# Altium footprint library Vibration_Datalogger.PcbLib: 76 footprints (part 3 of 5)
Each footprint in its own frame and in the unit in brackets; x right, y up, seen from the top. Pads: shape width x height; smd on the part's side, far side on the other; paste and mask are expansions set on the pad; w line width, h text height; cw(c..) or ccw(c..) is an arc to the next point about the centre after c.
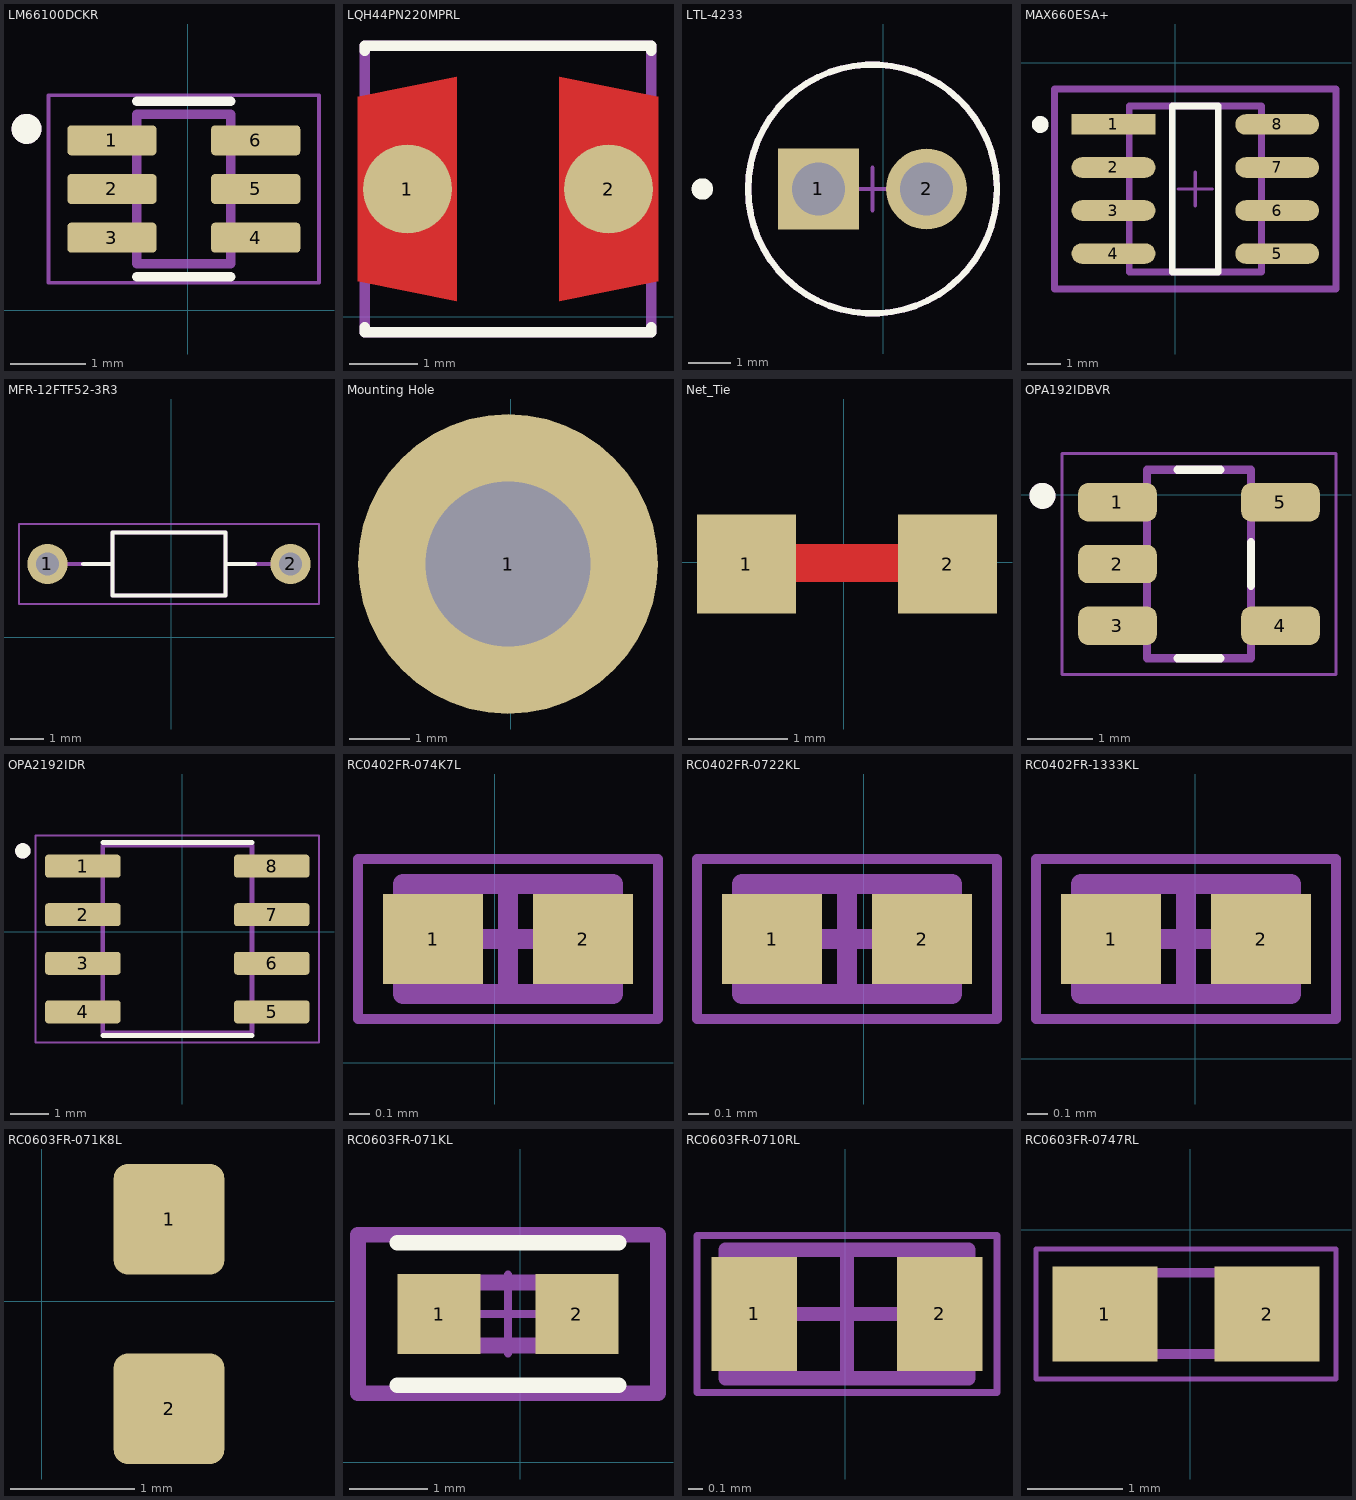
[diagram p2: the footprints below, top view; thin cyan lines are the x and y axes]

## LM66100DCKR [mm] "IC OR CTRLR IDEAL DIODE SC70-6"
pads (6):
  rrect25% 1.19x0.4 smd: 1(-1.01,2.27) 2(-1.01,1.62) 3(-1.01,0.97) 4(0.91,0.97) 5(0.91,1.62) 6(0.91,2.27)
Top Overlay:
  circle w0.2: c-2.15,2.422 r0.1
  lines w0.127: -0.675,0.45 0.575,0.45 ; -0.675,2.79 0.575,2.79
Mechanical 13:
  circle w0.2: c-2.15,2.422 r0.1
  lines w0.127: -0.675,0.62 -0.675,2.62 0.575,2.62 0.575,0.62 -0.675,0.62
Mechanical 15:
  lines w0.05: -1.855,0.37 -1.855,2.87 1.755,2.87 1.755,0.37 -1.855,0.37
3D body "step_temp.STEP": height 1.1, standoff 0, extent -1.1,0.62 1,2.62

## LQH44PN220MPRL [mm] "FIXED IND 22UH 900MA 290 MOHM"
pads (2):
  round 1.305 smd paste-2 mask+0: 1(-4.73,1.877) 2(-1.78,1.877)
Top Layer:
  region: -4.005,0.227 -5.455,0.527 -5.455,3.227 -4.005,3.527
  region: -1.055,3.227 -1.055,0.527 -2.505,0.227 -2.505,3.527
Top Overlay:
  lines w0.15: -5.355,-0.148 -5.355,-0.223 -1.155,-0.223 -1.155,-0.148 ; -5.355,3.902 -5.355,3.977 -1.155,3.977 -1.155,3.902
Top Paste:
  region: -4.005,0.227 -5.455,0.527 -5.455,3.227 -4.005,3.527
  region: -1.055,3.227 -1.055,0.527 -2.505,0.227 -2.505,3.527
Top Solder:
  region: -4.005,0.227 -5.455,0.527 -5.455,3.227 -4.005,3.527
  region: -1.055,3.227 -1.055,0.527 -2.505,0.227 -2.505,3.527
Mechanical 13:
  lines w0.15: -5.355,-0.223 -5.355,3.977 -1.155,3.977 -1.155,-0.223 -5.355,-0.223
3D body "step_temp.STEP": height 1.8, standoff 0, extent -5.25,-0.12 -1.25,3.88

## LTL-4233 [mm] "LED GREEN DIFFUSED T-1 3/4 T/H"
pads (2):
  rect 1.9x1.9 hole 1.25 paste-1000 mask+0: 1(-1.52,4.498)
  round 1.9 hole 1.25 paste-1000 mask+0: 2(1.02,4.498)
Top Overlay:
  circle w0.25: c-4.25,4.498 r0.125
  circle w0.15: c-0.25,4.498 r2.925
Mechanical 10:
  text ".Designator" at -2.59,8.02 h1
Mechanical 12:
  circle w0.15: c-0.25,4.498 r2.925
Mechanical 15:
  lines w0.1: -0.75,4.498 0.25,4.498 ; -0.25,3.998 -0.25,4.998
3D body "Download_STP_WL-TMRC-5mm+%28rev1%29.stp": height 18.75, standoff -16.35, extent -2.982,1.743 2.418,7.642

## MAX660ESA+ [mm] "IC REG CHRG PUMP INV 100MA 8SOIC"
pads (8):
  rect 2.474x0.607 smd paste+0 mask+0: 1(-1.829,-1.824)
  rrect100% 2.474x0.607 smd paste+0 mask+0: 2(-1.829,-3.094) 3(-1.829,-4.364) 4(-1.829,-5.634) 5(3.003,-5.634) 6(3.003,-4.364) 7(3.003,-3.094) 8(3.003,-1.824)
Top Overlay:
  circle w0.25: c-3.991,-1.824 r0.125
  lines w0.2: -0.092,-6.179 1.266,-6.179 1.266,-1.279 -0.092,-1.279 -0.092,-6.179
Mechanical 5:
  lines w0.2: -3.566,-6.679 4.74,-6.679 4.74,-0.779 -3.566,-0.779 -3.566,-6.679
  text ".Designator" at -1.8,-0.032 h1
Mechanical 13:
  lines w0.2: -1.363,-6.179 2.537,-6.179 2.537,-1.279 -1.363,-1.279 -1.363,-6.179
Mechanical 15:
  lines w0.2: -3.566,-6.679 4.74,-6.679 4.74,-0.779 -3.566,-0.779 -3.566,-6.679
Mechanical 16:
  lines w0.1: 0.087,-3.729 1.087,-3.729 ; 0.587,-4.229 0.587,-3.229
3D body "IC_Maxim_Integrated_MAX660ESA+_eec.STEP": height 0.25, standoff 0, extent -3.566,-6.679 4.74,-0.779

## MFR-12FTF52-3R3 [mm] "Through Hole 3.3 OHM 1/6W 1%"
pads (2):
  round 1.208 hole 0.7 mask+0.102: 1(-3.711,2.195) 2(3.589,2.195)
Top Overlay:
  lines w0.127: -2.637,2.195 -1.761,2.195 ; 2.515,2.195 1.639,2.195 ; -1.761,2.195 -1.761,3.145 1.639,3.145 1.639,2.195 ; -1.761,2.195 -1.761,1.245 1.639,1.245 1.639,2.195
Mechanical 13:
  lines w0.127: -3.161,2.195 -1.761,2.195 ; 3.039,2.195 1.639,2.195 ; -1.761,2.195 -1.761,3.145 1.639,3.145 1.639,2.195 ; -1.761,2.195 -1.761,1.245 1.639,1.245 1.639,2.195
Mechanical 15:
  lines w0.05: -4.566,0.995 -4.566,3.395 4.444,3.395 4.444,0.995 -4.566,0.995
3D body "step_temp.STEP": height 1.9, standoff -27.52, extent -3.936,1.245 3.814,3.145

## Mounting Hole [mm] "Mounting Hole PTH M2.5"
pads (1):
  round 5 hole 2.75: 1(-0.048,3.158)
3D body "Download_STEP_970170155 (rev1).stp": height -0.5, standoff -17.5, extent -3.037,0.7 2.737,5.7

## Net_Tie [mm]
pads (2):
  rect 1x1 smd: 1(-0.983,-0.02)
  rect 1x1 smd mask+0.102: 2(1.049,-0.02)
Top Layer:
  rectangle: -0.71,-0.201 0.687,0.18

## OPA192IDBVR [mm] "IC OPAMP GP 1 CIRCUIT SOT23-5"
pads (5):
  rrect50% 1.21x0.59 smd: 1(1.846,-0.113) 2(1.846,-1.063) 3(1.846,-2.013) 4(4.356,-2.013) 5(4.356,-0.113)
Top Overlay:
  circle w0.2: c0.691,-0.013 r0.1
  lines w0.127: 2.771,-2.513 3.431,-2.513 ; 2.771,0.387 3.431,0.387 ; 3.901,-1.398 3.901,-0.728
Mechanical 13:
  circle w0.2: c0.691,-0.013 r0.1
  lines w0.127: 2.301,-2.513 3.901,-2.513 3.901,0.387 2.301,0.387 2.301,-2.513
Mechanical 15:
  lines w0.05: 0.991,-2.763 0.991,0.637 5.211,0.637 5.211,-2.763 0.991,-2.763
3D body "step_temp.STEP": height 1.45, standoff 0, extent 1.701,-2.513 4.501,0.387

## OPA2192IDR [mm] "IC OPAMP GP 2 CIRCUIT 8SOIC"
pads (8):
  rrect25% 1.97x0.6 smd paste+0 mask+0.102: 1(-2.594,1.717) 2(-2.594,0.447) 3(-2.594,-0.823) 4(-2.594,-2.093) 5(2.346,-2.093) 6(2.346,-0.823) 7(2.346,0.447) 8(2.346,1.717)
Top Overlay:
  circle w0.2: c-4.164,2.117 r0.1
  lines w0.127: -2.074,-2.713 1.826,-2.713 ; -2.074,2.337 1.826,2.337
Mechanical 13:
  circle w0.2: c-4.164,2.117 r0.1
  lines w0.127: -2.074,-2.641 -2.074,2.264 1.826,2.264 1.826,-2.641 -2.074,-2.641
Mechanical 15:
  lines w0.05: -3.829,-2.89 -3.829,2.514 3.581,2.514 3.581,-2.89 -3.829,-2.89
3D body "step_temp.STEP": height 1.75, standoff 0, extent -3.119,-2.641 2.871,2.264

## RC0402FR-074K7L [mm] "RES 4.7K OHM 1% 1/16W 0402"
pads (2):
  rect 0.5x0.45 smd: 1(-0.309,0.619) 2(0.441,0.619)
Mechanical 13:
  lines w0.1: -0.459,0.344 -0.459,0.894 0.591,0.894 0.591,0.344 -0.459,0.344
Mechanical 15:
  lines w0.05: -0.684,0.219 -0.684,1.019 0.816,1.019 0.816,0.219 -0.684,0.219
  lines w0.1: -0.209,0.619 0.341,0.619 ; 0.066,0.344 0.066,0.894
3D body: height 0.4, standoff 0, extent -0.21,0.325 0.34,0.875
3D body: height 0.4, standoff 0, extent -0.459,0.344 -0.209,0.894
3D body: height 0.4, standoff 0, extent 0.341,0.344 0.591,0.894

## RC0402FR-0722KL [mm] "RES 22K OHM 1% 1/16W 0402"
pads (2):
  rect 0.5x0.45 smd: 1(-0.459,1.105) 2(0.291,1.105)
Mechanical 13:
  lines w0.1: -0.609,0.83 0.441,0.83 0.441,1.38 -0.609,1.38 -0.609,0.83
Mechanical 15:
  lines w0.05: -0.834,0.705 0.666,0.705 0.666,1.505 -0.834,1.505 -0.834,0.705
  lines w0.1: -0.359,1.105 0.191,1.105 ; -0.084,0.83 -0.084,1.38
3D body: height 0.4, standoff 0, extent 0.191,0.83 0.441,1.38
3D body: height 0.4, standoff 0, extent -0.609,0.83 -0.359,1.38
3D body: height 0.4, standoff 0, extent -0.359,0.83 0.191,1.38

## RC0402FR-1333KL [mm] "RES 33K OHM 1% 1/16W 0402"
pads (2):
  rect 0.5x0.45 smd: 1(-0.42,0.598) 2(0.33,0.598)
Mechanical 13:
  lines w0.1: -0.57,0.323 0.48,0.323 0.48,0.873 -0.57,0.873 -0.57,0.323
Mechanical 15:
  lines w0.05: -0.795,0.198 0.705,0.198 0.705,0.998 -0.795,0.998 -0.795,0.198
  lines w0.1: -0.32,0.598 0.23,0.598 ; -0.045,0.323 -0.045,0.873
3D body: height 0.4, standoff 0, extent 0.23,0.323 0.48,0.873
3D body: height 0.4, standoff 0, extent -0.57,0.323 -0.32,0.873
3D body: height 0.4, standoff 0, extent -0.32,0.323 0.23,0.873

## RC0603FR-071K8L [mil] "RES 1.8K OHM 1% 1/10W 0603"
pads (2):
  rrect25% 35x35 smd: 1(40.27,26) 2(40.27,-34)
3D body "step_temp.STEP": height 21.65, standoff 0, extent 24.52,-30.5 56.02,32.5

## RC0603FR-071KL [mm] "RES 1K OHM 1% 1/10W 0603"
pads (2):
  rect 1.059x1.012 smd paste+0 mask+0: 1(-1.032,1.887) 2(0.722,1.887)
Top Overlay:
  lines w0.2: -1.561,0.981 1.251,0.981 ; -1.561,2.793 1.251,2.793
Mechanical 5:
  lines w0.2: -2.061,0.881 1.751,0.881 1.751,2.893 -2.061,2.893 -2.061,0.881
  text ".Designator" at -2.36,3.278 h1
Mechanical 13:
  lines w0.2: -0.955,1.487 0.645,1.487 0.645,2.287 -0.955,2.287 -0.955,1.487
Mechanical 15:
  lines w0.2: -2.061,0.881 1.751,0.881 1.751,2.893 -2.061,2.893 -2.061,0.881
Mechanical 16:
  lines w0.1: -0.655,1.887 0.345,1.887 ; -0.155,1.387 -0.155,2.387
3D body "Res_Yageo_RC0603FR-07100KL_eec.STEP": height 0.25, standoff 0, extent -2.061,0.881 1.751,2.893

## RC0603FR-0710RL [mm] "RES 10 OHM 1% 1/10W 0603"
pads (2):
  rect 0.6x0.8 smd: 1(-0.636,1.278) 2(0.664,1.278)
Mechanical 13:
  lines w0.1: -0.836,0.828 -0.836,1.728 0.864,1.728 0.864,0.828 -0.836,0.828
Mechanical 15:
  lines w0.05: -1.036,0.728 -1.036,1.828 1.064,1.828 1.064,0.728 -1.036,0.728
  lines w0.1: -0.436,1.278 0.464,1.278 ; 0.014,0.828 0.014,1.728
3D body: height 0.55, standoff 0, extent -0.586,0.828 0.614,1.728
3D body: height 0.55, standoff 0, extent -0.836,0.828 -0.586,1.728
3D body: height 0.55, standoff 0, extent 0.614,0.828 0.864,1.728

## RC0603FR-0747RL [mm] "RES 47 OHM 1% 1/10W 0603"
pads (2):
  rect 1.1x1 smd: 1(-0.897,-0.886) 2(0.803,-0.886)
Mechanical 13:
  region: -0.385,-1.356 -0.886,-1.356 -0.886,-0.406 -0.385,-0.406
  region: 0.783,-1.356 0.283,-1.356 0.283,-0.406 0.783,-0.406
  lines w0.102: -0.403,-1.305 0.309,-1.305 ; -0.403,-0.454 0.309,-0.454
Mechanical 15:
  lines w0.051: -1.62,-1.569 1.526,-1.569 1.526,-0.203 -1.62,-0.203 -1.62,-1.569
3D body "step_temp.STEP": height 0.55, standoff 0, extent -0.847,-1.286 0.753,-0.486